# Altium footprint library Borisov.pcblib: 48 footprints (part 1 of 3)
Each footprint in its own frame and in the unit in brackets; x right, y up, seen from the top. Pads: shape width x height; smd on the part's side, far side on the other; paste and mask are expansions set on the pad; w line width, h text height; cw(c..) or ccw(c..) is an arc to the next point about the centre after c.
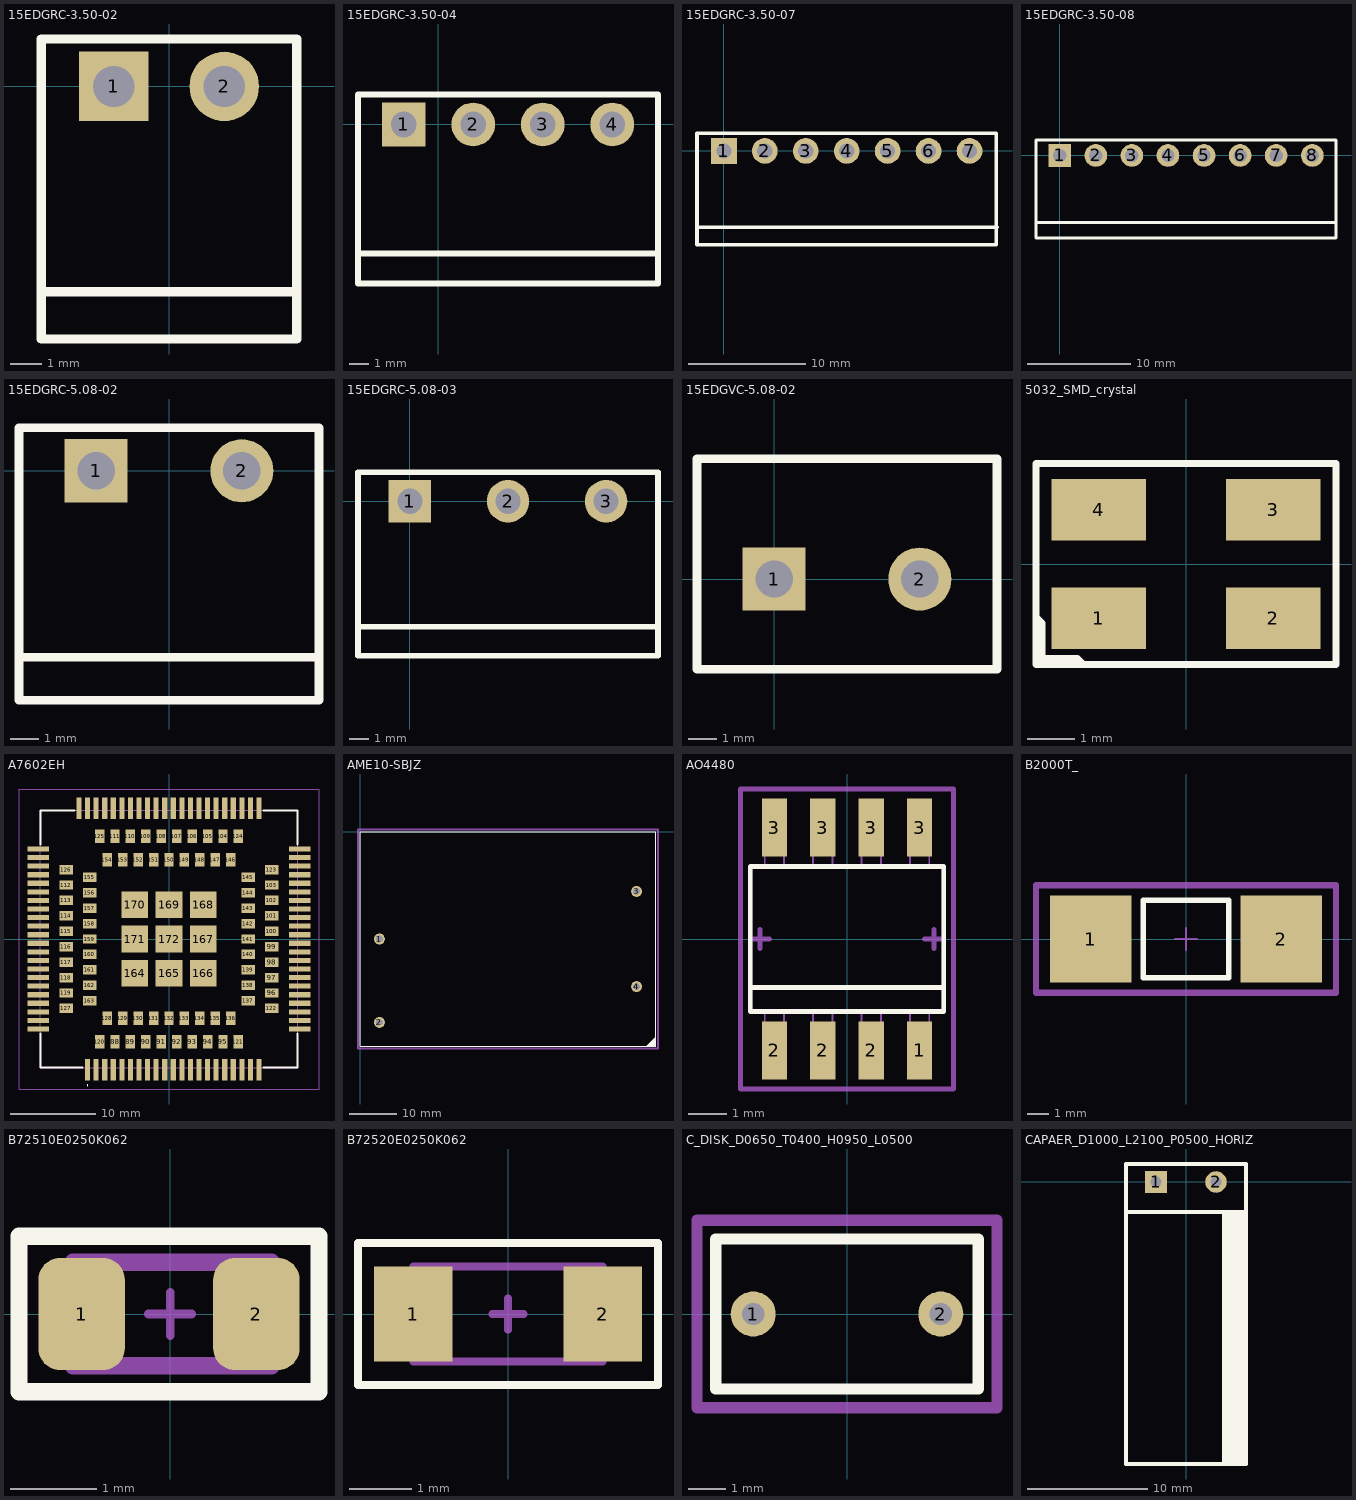
[diagram p0: the footprints below, top view; thin cyan lines are the x and y axes]

## 15EDGRC-3.50-02 [mm] "Клеммник разъемный угловой 3.5мм 2pin на плату"
height 7.24
pads (2):
  rect 2.2x2.2 hole 1.3: 1(-1.75,0)
  round 2.2 hole 1.3: 2(1.75,0)
Top Overlay:
  lines w0.3: -4,-6.5 4,-6.5 ; -4.05,-8 4.05,-8 4.05,1.5 -4.05,1.5 -4.05,-8
3D body "15EDGRC-3.5-02.step": height 7.1, standoff -3.4, extent -3.9,-8 3.9,1.2

## 15EDGRC-3.50-04 [mm] "Клеммник разъемный угловой 3.5мм 4pin на плату"
height 7.24
pads (4):
  rect 2.2x2.2 hole 1.3: 1(-1.75,0)
  round 2.2 hole 1.3: 2(1.75,0) 3(5.25,0) 4(8.75,0)
Top Overlay:
  lines w0.3: -4,-6.5 11,-6.5 ; -4.05,-8 11.05,-8 11.05,1.5 -4.05,1.5 -4.05,-8
3D body "15EDGRC-3.5-04.step": height 7.1, standoff -3.4, extent -3.9,-8 10.9,1.2

## 15EDGRC-3.50-07 [mm] "Клеммник разъемный угловой 3.5мм 7pin на плату"
height 7.24
pads (7):
  rect 2.2x2.2 hole 1.3: 1(0,0)
  round 2.2 hole 1.3: 2(3.5,0) 3(7,0) 4(10.5,0) 5(14,0) 6(17.5,0) 7(21,0)
Top Overlay:
  lines w0.3: -2.25,-6.5 23.35,-6.5 ; -2.3,-8 23.3,-8 23.3,1.5 -2.3,1.5 -2.3,-8
3D body "15EDGRC-3.5-07.step": height 7.1, standoff -3.4, extent -2.15,-8 23.15,1.2

## 15EDGRC-3.50-08 [mm] "Клеммник разъемный угловой 3.5мм 8pin на плату"
height 7.24
pads (8):
  rect 2.2x2.2 hole 1.3: 1(0,0)
  round 2.2 hole 1.3: 2(3.5,0) 3(7,0) 4(10.5,0) 5(14,0) 6(17.5,0) 7(21,0) 8(24.5,0)
Top Overlay:
  lines w0.3: -2.3,-6.5 26.8,-6.5 ; -2.3,-8 26.8,-8 26.8,1.5 -2.3,1.5 -2.3,-8
3D body "15EDGRC-3.5-08.step": height 7.1, standoff -3.4, extent -2.15,-8 26.65,1.2

## 15EDGRC-5.08-02 [mm] "Клеммник разъемный угловой 5.08мм 2pin на плату"
height 7.24
pads (2):
  rect 2.2x2.2 hole 1.3: 1(-2.54,0)
  round 2.2 hole 1.3: 2(2.54,0)
Top Overlay:
  lines w0.3: -5.23,-6.5 5.23,-6.5 ; -5.23,-8 5.23,-8 5.23,1.5 -5.23,1.5 -5.23,-8
3D body "15EDGRC-5.08-02.step": height 7.1, standoff -3.4, extent -5.08,-8 5.08,1.2

## 15EDGRC-5.08-03 [mm] "Клеммник разъемный угловой 5.08мм 3pin на плату"
height 7.24
pads (3):
  rect 2.2x2.2 hole 1.3: 1(0,0)
  round 2.2 hole 1.3: 2(5.08,0) 3(10.16,0)
Top Overlay:
  lines w0.3: -2.69,-6.5 12.85,-6.5 ; -2.69,-8 -2.69,1.5 12.85,1.5 12.85,-8 -2.69,-8
3D body "15EDGRC-5.08-03.step": height 7.1, standoff -3.4, extent -2.54,-8 12.7,1.2

## 15EDGVC-5.08-02 [mm] "Клеммник разъемный прямой 5.08мм 2pin на плату"
pads (2):
  rect 2.2x2.2 hole 1.3: 1(0,0)
  round 2.2 hole 1.3: 2(5.08,0)
Top Overlay:
  lines w0.3: -2.69,-3.15 7.77,-3.15 7.77,4.2 -2.69,4.2 -2.69,-3.15
3D body "15EDGVC-5.08-02.step": height 9.2, standoff -3.8, extent -2.54,-3 7.62,4.1

## 5032_SMD_crystal [mm]
pads (4):
  rect 2x1.3 smd: 1(-1.85,-1.15) 2(1.85,-1.15) 3(1.85,1.15) 4(-1.85,1.15)
Top Overlay:
  lines w0.15: -3.175,-1.125 -3.05,-1.25 -3.05,-2 -2.3,-2 -2.175,-2.125 ; -3.175,-2.125 3.175,-2.125 3.175,2.125 -3.175,2.125 -3.175,-2.125
3D body "kx-9a.step": height 1, standoff 0, extent -2.5,-1.6 2.5,1.6

## A7602EH [mm]
pads (172):
  rect 0.6x2.5 smd: 1(-9.5,-15.25) 2(-8.5,-15.25) 3(-7.5,-15.25) 4(-6.5,-15.25) 5(-5.5,-15.25) 6(-4.5,-15.25) 7(-3.5,-15.25) 8(-2.5,-15.25) 9(-1.5,-15.25) 10(-0.5,-15.25) 11(0.5,-15.25) 12(1.5,-15.25) 13(2.5,-15.25) 14(3.5,-15.25) 15(4.5,-15.25) 16(5.5,-15.25) 17(6.5,-15.25) 18(7.5,-15.25) 19(8.5,-15.25) 20(9.5,-15.25) 41(9.5,15.25) 42(8.5,15.25) 43(7.5,15.25) 44(6.5,15.25) 45(5.5,15.25) 46(4.5,15.25) 47(3.5,15.25) 48(2.5,15.25) 49(1.5,15.25) 50(0.5,15.25) 51(-0.5,15.25) 52(-1.5,15.25) 53(-2.5,15.25) 54(-3.5,15.25) 55(-4.5,15.25) 56(-5.5,15.25) 57(-6.5,15.25) 58(-7.5,15.25) 59(-8.5,15.25) 60(-9.5,15.25) 81(10.5,-15.25) 82(10.5,15.25) 85(-10.5,15.25)
  rect 2.5x0.6 smd: 21(15.25,-9.5) 22(15.25,-8.5) 23(15.25,-7.5) 24(15.25,-6.5) 25(15.25,-5.5) 26(15.25,-4.5) 27(15.25,-3.5) 28(15.25,-2.5) 29(15.25,-1.5) 30(15.25,-0.5) 31(15.25,0.5) 32(15.25,1.5) 33(15.25,2.5) 34(15.25,3.5) 35(15.25,4.5) 36(15.25,5.5) 37(15.25,6.5) 38(15.25,7.5) 39(15.25,8.5) 40(15.25,9.5) 61(-15.25,9.5) 62(-15.25,8.5) 63(-15.25,7.5) 64(-15.25,6.5) 65(-15.25,5.5) 66(-15.25,4.5) 67(-15.25,3.5) 68(-15.25,2.5) 69(-15.25,1.5) 70(-15.25,0.5) 71(-15.25,-0.5) 72(-15.25,-1.5) 73(-15.25,-2.5) 74(-15.25,-3.5) 75(-15.25,-4.5) 76(-15.25,-5.5) 77(-15.25,-6.5) 78(-15.25,-7.5) 79(-15.25,-8.5) 80(-15.25,-9.5) 83(15.25,10.5) 84(15.25,-10.5) 86(-15.25,-10.5) 87(-15.25,10.5)
  rect 1.1x1.6 smd: 88(-6.3,-12) 89(-4.5,-12) 90(-2.7,-12) 91(-0.9,-12) 92(0.9,-12) 93(2.7,-12) 94(4.5,-12) 95(6.3,-12) 104(6.3,12) 105(4.5,12) 106(2.7,12) 107(0.9,12) 108(-0.9,12) 109(-2.7,12) 110(-4.5,12) 111(-6.3,12) 120(-8.1,-12) 121(8.1,-12) 124(8.1,12) 125(-8.1,12) 128(-7.2,-9.25) 129(-5.4,-9.25) 130(-3.6,-9.25) 131(-1.8,-9.25) 132(0,-9.25) 133(1.8,-9.25) 134(3.6,-9.25) 135(5.4,-9.25) 136(7.2,-9.25) 146(7.2,9.25) 147(5.4,9.25) 148(3.6,9.25) 149(1.8,9.25) 150(0,9.25) 151(-1.8,9.25) 152(-3.6,9.25) 153(-5.4,9.25) 154(-7.2,9.25)
  rect 1.6x1.1 smd: 96(12,-6.3) 97(12,-4.5) 98(12,-2.7) 99(12,-0.9) 100(12,0.9) 101(12,2.7) 102(12,4.5) 103(12,6.3) 112(-12,6.3) 113(-12,4.5) 114(-12,2.7) 115(-12,0.9) 116(-12,-0.9) 117(-12,-2.7) 118(-12,-4.5) 119(-12,-6.3) 122(12,-8.1) 123(12,8.1) 126(-12,8.1) 127(-12,-8.1) 137(9.25,-7.2) 138(9.25,-5.4) 139(9.25,-3.6) 140(9.25,-1.8) 141(9.25,0) 142(9.25,1.8) 143(9.25,3.6) 144(9.25,5.4) 145(9.25,7.2) 155(-9.25,7.2) 156(-9.25,5.4) 157(-9.25,3.6) 158(-9.25,1.8) 159(-9.25,0) 160(-9.25,-1.8) 161(-9.25,-3.6) 162(-9.25,-5.4) 163(-9.25,-7.2)
  rect 3.1x3.1 smd: 164(-4,-4) 165(0,-4) 166(4,-4) 167(4,0) 168(4,4) 169(0,4) 170(-4,4) 171(-4,0) 172(0,0)
Top Overlay:
  lines w0.1: -9.5,-17.1 ccw(c-9.5,-17.05) -9.5,-17 ccw(c-9.5,-17.05) -9.5,-17.1
  lines w0.2: -15,-11 -15,-15 -10.1,-15 ; -15,11 -15,15 -11,15 ; 11,-15 15,-15 15,-11 ; 11,15 15,15 15,11
Mechanical 13:
  lines w0.1: -15,-15 -15,15 15,15 15,-15 -15,-15
Mechanical 15:
  lines w0.1: -17.5,-17.5 -17.5,17.5 17.5,17.5 17.5,-17.5 -17.5,-17.5
3D body "A7602E-H.stp": height 2.8, standoff 0, extent -15,-15 15,15

## AME10-SBJZ [mm]
pads (4):
  round 2.3 hole 1.4: 1(4,-22.5) 2(4,-40) 3(58,-12.5) 4(58,-32.5)
Top Overlay:
  region: 62,-43 62,-45 60,-45
  lines w0.254: 0,-45 0,0 62,0 62,-45 0,-45
Mechanical 15:
  lines w0.5: -0.5,-45.5 -0.5,0.5 62.5,0.5 62.5,-45.5 -0.5,-45.5
3D body "AME10.stp": height 30, standoff -6, extent 0,-45 62,0

## AO4480 [mil]
pads (8):
  rect 26x60 smd: 1(75,-115) 2(-75,-115) 2(-25,-115) 2(25,-115) 3(-75,115) 3(-25,115) 3(25,115) 3(75,115)
Top Overlay:
  lines w5: -100,-50 100,-50 ; -100,-75 100,-75 100,75 -100,75 -100,-75
Mechanical 5:
  lines w2: -85,-105 -65,-105 ; -85,-95 -65,-95 ; -85,-75 -85,-130 -65,-130 -65,-75 ; -85,75 -85,130 -65,130 -65,75 ; -85,95 -65,95 ; -85,105 -65,105 ; -35,-105 -15,-105 ; -35,-95 -15,-95 ; -35,-75 -35,-130 -15,-130 -15,-75 ; -35,75 -35,130 -15,130 -15,75 ; -35,95 -15,95 ; -35,105 -15,105 ; 15,-105 35,-105 ; 15,-95 35,-95 ; 15,-75 15,-130 35,-130 35,-75 ; 15,75 15,130 35,130 35,75 ; 15,95 35,95 ; 15,105 35,105 ; 65,-105 85,-105 ; 65,-95 85,-95 ; 65,-75 65,-130 85,-130 85,-75 ; 65,75 65,130 85,130 85,75 ; 65,95 85,95 ; 65,105 85,105
  lines w5: -100,-50 100,-50 ; -100,-75 -100,75 100,75 100,-75 -100,-75
  text "'.Designator'" at -64.99,-15 h60
Mechanical 11:
  lines w5: -100,0 -80,0 ; -90,-10 -90,10 ; 80,0 100,0 ; 90,-10 90,10
Mechanical 15:
  lines w5: -110,-155 110,-155 110,155 -110,155 -110,-155
3D body "SO-8.STEP": height 72.83, standoff 0, extent -98.43,-125.98 98.42,125.99

## B2000T_ [mm] "FUSE BOARD MOUNT 2A 600VAC 2SMD"
pads (2):
  rect 3.81x4.06 smd mask+0.2: 1(-4.445,0) 2(4.445,0)
Top Overlay:
  lines w0.254: -2,-1.8 -2,1.8 2,1.8 2,-1.8 -2,-1.8
Top Component Center:
  lines w0.1: -0.5,0 0.5,0 ; 0,-0.5 0,0.5
Board:
  lines w0.3: -7,-2.5 7,-2.5 7,2.5 -7,2.5 -7,-2.5
3D body "B2000T.step": height 3.05, standoff 0, extent -4.825,-1.525 4.825,1.525

## B72510E0250K062 [mm] "B72510E0250K062 (CT0805K25G), 25В, Варистор"
pads (2):
  rrect50% 1x1.3 smd: 1(-1.025,0) 2(1,0)
Top Overlay:
  lines w0.2: -1.75,0.675 -1.75,-0.9 1.725,-0.9 1.725,0.9 -1.625,0.9 ; -1.75,0.7 -1.75,0.9 -1.65,0.9
Mechanical 3:
  lines w0.1: -0.25,0 0.25,0 ; 0,-0.25 0,0.25 ; -1.75,-0.9 1.725,-0.9 1.725,0.9 -1.75,0.9 -1.75,-0.9
Mechanical 5:
  lines w0.2: -1.125,-0.6 1.175,-0.6 1.175,0.6 -1.025,0.6 -1.125,0.6 -1.125,-0.6
3D body "B72510E0250K062.stp": height 1.4, standoff 0, extent -1,-0.627 1,0.627

## B72520E0250K062 [mil] "B72520E0250K062, 1206, 1206 31Vdc/25Vac"
pads (2):
  rect 50x60 smd: 1(-60,0) 2(60,0)
Top Overlay:
  lines w5: -95,-45 95,-45 95,45 -95,45 -95,-45
Mechanical 5:
  lines w5: -60,-30 60,-30 60,30 -60,30 -60,-30
  text "'.Designator'" at -50,-10 h40
Mechanical 11:
  lines w5: -10,0 10,0 ; 0,-10 0,10
Mechanical 15:
  lines w5: -95,-45 95,-45 95,45 -95,45 -95,-45
3D body "B72520E0250K062.stp": height 67.15, standoff 0.02, extent -62.99,-31.59 62.99,31.59

## C_DISK_D0650_T0400_H0950_L0500 [mm]
pads (2):
  round 1.2 hole 0.6: 1(-2.5,0) 2(2.5,0)
Top Overlay:
  lines w0.3: -3.5,-2 3.5,-2 3.5,2 -3.5,2 -3.5,-2
Board:
  lines w0.3: -4,-2.5 -4,2.5 4,2.5 4,-2.5 -4,-2.5
3D body "C_DISK_D0650_T0400_H0950_L0500.step": height 9, standoff -5.5, extent -3.25,-1.6 3.246,1.6

## CAPAER_D1000_L2100_P0500_HORIZ [mm]
pads (2):
  rect 1.8x1.8 hole 0.9: 1(-2.5,0)
  round 1.8 hole 0.9: 2(2.5,0)
Top Overlay:
  rectangle: 3,-23.5 5,-2.5
  lines w0.3: -5,-2.5 5,-2.5 ; -5,-2.5 -5,1.5 5,1.5 5,-2.5 ; -5,-2.5 -5,-23.5 5,-23.5 5,-2.5
3D body "CAPAER_D1000_L2100_P0500_HORIZ.step": height 10, standoff -3, extent -5,-23.5 5,0.3